# Altium footprint library PBL - THD Packages.PcbLib: 160 footprints (part 10 of 10)
Each footprint in its own frame and in the unit in brackets; x right, y up, seen from the top. Pads: shape width x height; smd on the part's side, far side on the other; paste and mask are expansions set on the pad; w line width, h text height; cw(c..) or ccw(c..) is an arc to the next point about the centre after c.
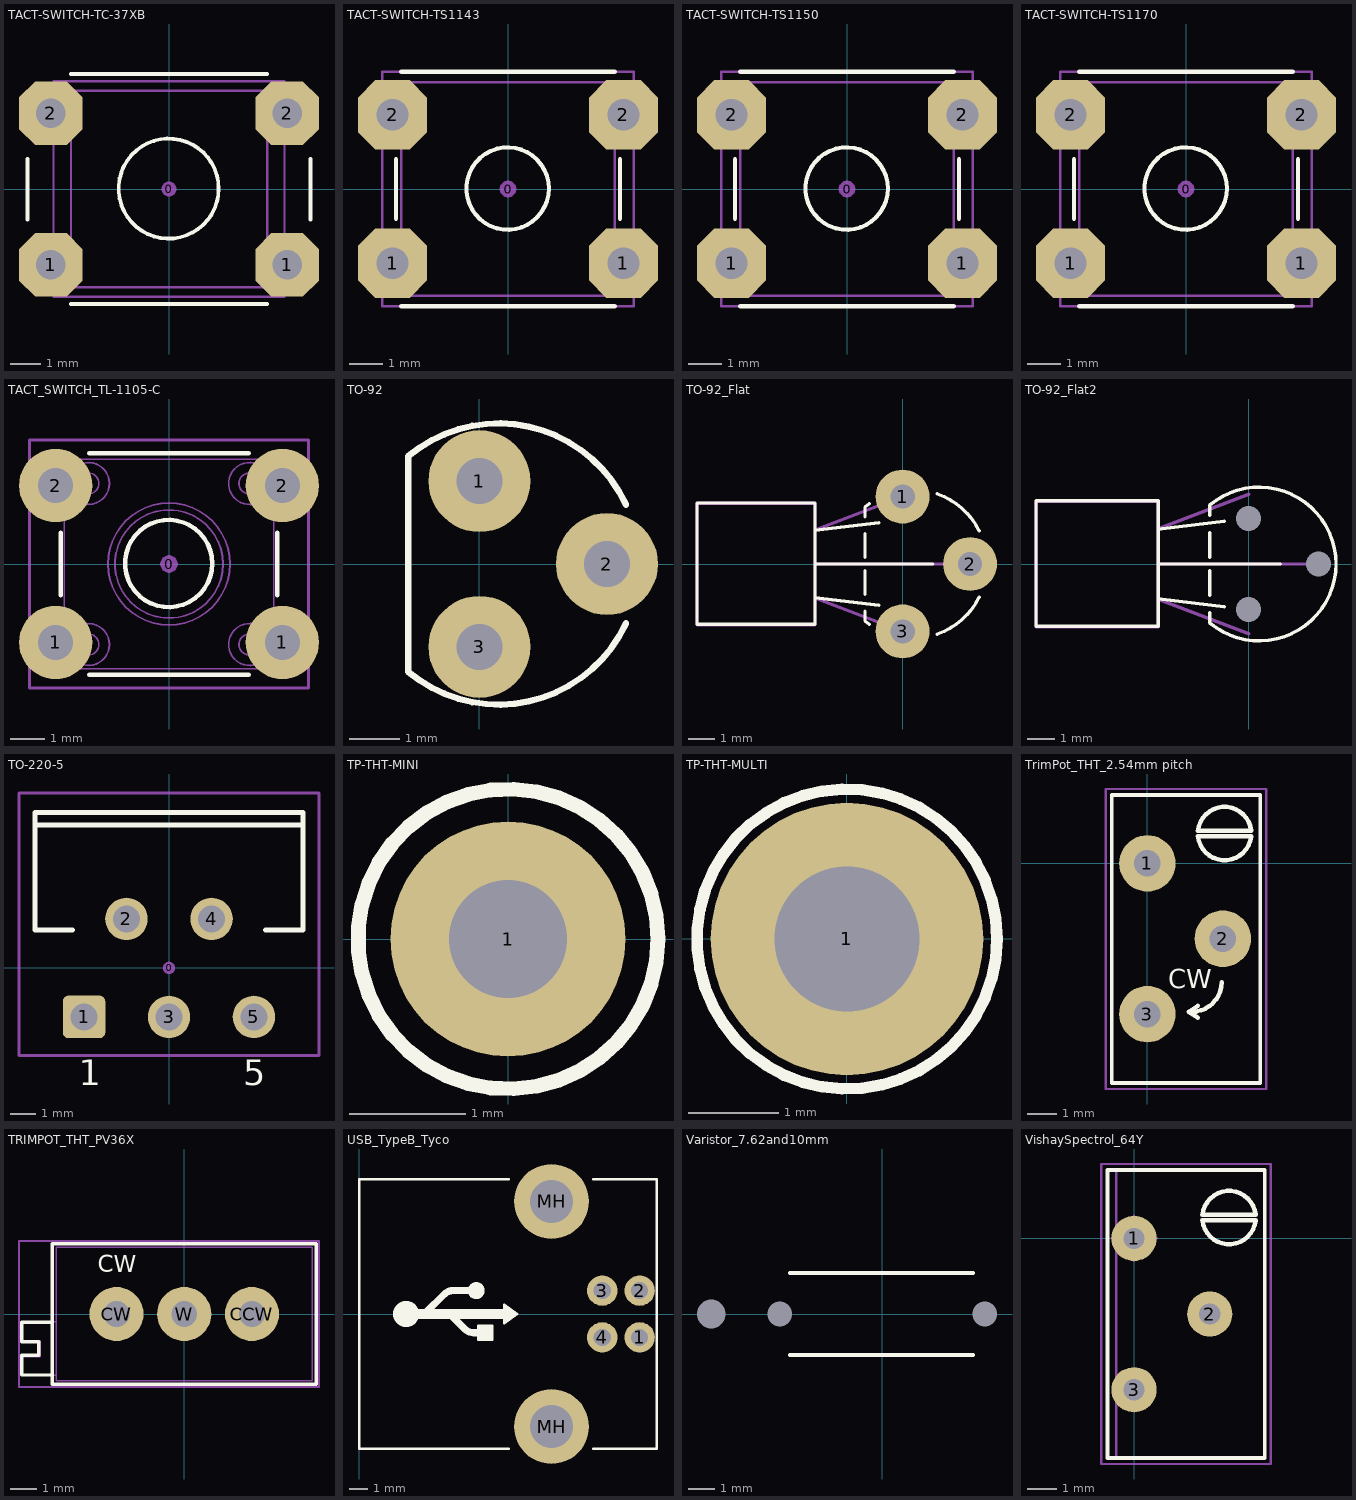
[diagram p9: the footprints below, top view; thin cyan lines are the x and y axes]

## TACT-SWITCH-TC-37XB [mm] "Wealth Metal sealed TH tact switch"
height 5
pads (5):
  round 0.508 on Mech15: 0(0,0)
  oct 2.1x2.1 hole 0.965: 1(-3.9,-2.5) 1(3.9,-2.5) 2(-3.9,2.5) 2(3.9,2.5)
Top Overlay:
  circle w0.127: c-0.011,0.014 r1.65
  lines w0.127: -4.67,-1 -4.67,1 ; -3.239,-3.791 3.24,-3.791 ; -3.232,3.794 3.24,3.794 ; 4.67,-1 4.67,1
13 - 3D Top Side:
  circle w0.076: c-0.011,0.014 r1.65
  lines w0.076: -3.232,-3.237 3.24,-3.237 3.24,3.24 -3.232,3.24 -3.232,-3.237
15 - Top Courtyards:
  lines w0.076: -3.81,-3.556 -3.81,3.556 3.81,3.556 3.81,-3.556 -3.81,-3.556
3D body: height 5, standoff -3.9, extent -4.456,-3.6 4.456,3.6

## TACT-SWITCH-TS1143 [mm] "Bondtact sealed TH tact switch"
height 4.318
pads (5):
  round 0.508 on Mech15: 0(0,0)
  oct 2.1x2.1 hole 0.965: 1(-3.5,-2.25) 1(3.5,-2.25) 2(-3.5,2.25) 2(3.5,2.25)
Top Overlay:
  circle w0.127: c-0.011,0.014 r1.25
  lines w0.127: -3.4,-0.9 -3.4,0.9 ; -3.239,-3.556 3.24,-3.556 ; -3.236,3.556 3.236,3.556 ; 3.4,-0.9 3.4,0.9
13 - 3D Top Side:
  circle w0.076: c-0.011,0.014 r1.25
  lines w0.076: -3.232,-3.237 -3.232,3.24 3.24,3.24 3.24,-3.237 -3.232,-3.237
15 - Top Courtyards:
  lines w0.076: -3.81,-3.556 3.81,-3.556 3.81,3.556 -3.81,3.556 -3.81,-3.556
3D body: height 4.3, standoff -3.5, extent -4.134,-3.25 4.134,3.25

## TACT-SWITCH-TS1150 [mm] "Bondtact sealed TH tact switch"
height 5.18
pads (5):
  round 0.508 on Mech15: 0(0,0)
  oct 2.1x2.1 hole 0.965: 1(-3.5,-2.25) 1(3.5,-2.25) 2(-3.5,2.25) 2(3.5,2.25)
Top Overlay:
  circle w0.127: c-0.011,0.014 r1.25
  lines w0.127: -3.4,-0.9 -3.4,0.9 ; -3.239,-3.556 3.24,-3.556 ; -3.236,3.556 3.236,3.556 ; 3.4,-0.9 3.4,0.9
13 - 3D Top Side:
  circle w0.076: c-0.011,0.014 r1.25
  lines w0.076: -3.232,-3.237 -3.232,3.24 3.24,3.24 3.24,-3.237 -3.232,-3.237
15 - Top Courtyards:
  lines w0.076: -3.81,-3.556 3.81,-3.556 3.81,3.556 -3.81,3.556 -3.81,-3.556
3D body: height 5, standoff -3.5, extent -4.134,-3.25 4.134,3.25

## TACT-SWITCH-TS1170 [mm] "Bondtact sealed TH tact switch"
height 6.985
pads (5):
  round 0.508 on Mech15: 0(0,0)
  oct 2.1x2.1 hole 0.965: 1(-3.5,-2.25) 1(3.5,-2.25) 2(-3.5,2.25) 2(3.5,2.25)
Top Overlay:
  circle w0.127: c-0.011,0.014 r1.25
  lines w0.127: -3.4,-0.9 -3.4,0.9 ; -3.239,-3.556 3.24,-3.556 ; -3.236,3.556 3.236,3.556 ; 3.4,-0.9 3.4,0.9
13 - 3D Top Side:
  circle w0.076: c-0.011,0.014 r1.25
  lines w0.076: -3.232,-3.237 3.24,-3.237 3.24,3.24 -3.232,3.24 -3.232,-3.237
15 - Top Courtyards:
  lines w0.076: -3.81,-3.556 -3.81,3.556 3.81,3.556 3.81,-3.556 -3.81,-3.556
3D body: height 7, standoff -3.5, extent -4.134,-3.25 4.134,3.25

## TACT_SWITCH_TL-1105-C [mm] "E-Switch TL1105 series tact switch 8.0mm stem height"
height 8
pads (5):
  round 0.508 on Mech15: 0(0,0)
  round 2.1 hole 1: 1(-3.25,-2.25) 1(3.25,-2.25) 2(-3.25,2.25) 2(3.25,2.25)
Top Overlay:
  circle w0.127: c-0.011,0.014 r1.25
  lines w0.127: -3.1,-0.9 -3.1,0.9 ; -2.286,-3.175 2.286,-3.175 ; -2.286,3.175 2.286,3.175 ; 3.1,-0.9 3.1,0.9
13 - 3D Top Side:
  circle w0.05: c0,0 r1.55
  circle w0.05: c0,0 r1.75
  circle w0.05: c-2.31,2.309 r0.3
  circle w0.05: c2.307,2.309 r0.3
  circle w0.05: c-2.31,-2.308 r0.3
  circle w0.05: c2.307,-2.308 r0.3
  circle w0.05: c2.309,2.309 r0.6
  circle w0.05: c-2.309,2.309 r0.6
  circle w0.05: c2.309,-2.309 r0.6
  circle w0.05: c-2.309,-2.309 r0.6
  lines w0.05: -3.886,-2.65 -3.886,-1.85 ; -3.886,1.85 -3.886,2.65 ; -3.3,-2.65 -3.3,-1.85 ; -3.3,1.85 -3.3,2.65 ; -3.15,-2.65 -3.15,-1.85 ; -3.15,1.85 -3.15,2.65 ; -3,-2.65 -3.95,-2.65 -3.95,-1.85 -3,-1.85 ; -3,1.85 -3.95,1.85 -3.95,2.65 -3,2.65 ; -2.561,-2.853 ccw(c-2.309,-2.309) -2.538,-2.863 ; -2.561,1.764 ccw(c-2.309,2.309) -2.538,1.754 ; 2.056,-2.853 ccw(c2.309,-2.309) 2.079,-2.863 ; 2.056,1.764 ccw(c2.309,2.309) 2.079,1.754 ; 3,-2.65 3.95,-2.65 3.95,-1.85 3,-1.85 ; 3,1.85 3.95,1.85 3.95,2.65 3,2.65 ; 3.15,-2.65 3.15,-1.85 ; 3.15,1.85 3.15,2.65 ; 3.3,-2.65 3.3,-1.85 ; 3.3,1.85 3.3,2.65 ; 3.886,-2.65 3.886,-1.85 ; 3.886,1.85 3.886,2.65 ; -3,-3 -3,3 3,3 3,-3 -3,-3
15 - Top Courtyards:
  lines w0.076: -4,-3.556 -4,3.556 4,3.556 4,-3.556 -4,-3.556
3D body: height 8, standoff -3.5, extent -3.95,-3 3.95,3

## TO-92 [mil]
height 397.64
pads (3):
  round 80 hole 36: 1(0,65) 2(100,0) 3(0,-65)
Top Overlay:
  lines w5: 114.91,-46.59 cw(c15,0) -55.86,-84.45 -55.86,84.45 cw(c15,0) 114.91,46.59
3D body: height 404.72, standoff -100, extent -54.52,-94.57 107.49,94.56

## TO-92_Flat [mil]
height 151.57
pads (3):
  round 80 hole 36: 1(0,100) 2(100,0) 3(0,-100)
Top Overlay:
  lines w5: -130.03,0 45,0 ; -130,-50 -35.14,-61.16 ; -130,50 -35.14,61.16 ; -55.86,-70 -55.86,-84.45 ccw(c15,0) -49.54,-89.37 ; -55.86,-45 -55.86,-10 ; -55.86,10 -55.86,45 ; -55.86,70 -55.86,84.45 cw(c15,0) -49.54,89.37 ; 51.42,-104.05 ccw(c15,0) 113.6,-49.3 ; 51.42,104.05 cw(c15,0) 113.6,49.3 ; -305.03,-89.45 -130.03,-89.45 -130.03,90.55 -305.03,90.55 -305.03,-89.45
13 - 3D Top Side:
  lines w5: -130,-50.44 0,-100 ; -130,0.1 100,0 ; -130,50.44 0,100 ; -305,-90 -130,-90 -130,90 -305,90 -305,-90
3D body: height 141.73, standoff -100, extent -307.08,-109.84 109.85,109.85

## TO-92_Flat2 [mil]
height 151.57
pads (3):
  round 0 / inner round 0 / far side round 80 hole 36 unplated: 1(0,65) 2(100,0) 3(0,-65)
Top Overlay:
  lines w5: -130.03,0 45,0 ; -130,-50 -35.14,-61.16 ; -130,50 -35.14,61.16 ; -55.86,-70 -55.86,-84.45 ccw(c15,0) -55.86,84.45 -55.86,70 ; -55.86,-45 -55.86,-10 ; -55.86,10 -55.86,45 ; -305.03,-89.45 -305.03,90.55 -130.03,90.55 -130.03,-89.45 -305.03,-89.45
13 - 3D Top Side:
  lines w5: -130,-50.44 0,-100 ; -130,0.1 100,0 ; -130,50.44 0,100 ; -305,-90 -305,90 -130,90 -130,-90 -305,-90
3D body: height 141.73, standoff -100, extent -307.08,-94.48 109.85,94.5

## TO-220-5 [mm] "TO, Thru-Hole, Vertical, Heatsink Mounted; 5 Bent Staggered Leads; Pitch 1.7mm"
height 21.1
pads (6):
  round 0.5 on Mech15: 0(0,0)
  rrect25% 1.7x1.7 hole 1.092: 1(-3.4,-1.96)
  round 1.7 hole 1.092: 2(-1.7,1.96) 3(0,-1.96) 4(1.7,1.96) 5(3.4,-1.96)
Top Overlay:
  lines w0.2: -5.35,5.71 5.35,5.71 ; -3.854,1.51 -5.35,1.51 -5.35,6.21 5.35,6.21 5.35,1.51 3.854,1.51
  text "1" at -3.62,-4.685 h1.02
  text "5" at 2.98,-4.685 h1.02
15 - Top Courtyards:
  lines w0.127: -6,-3.5 -6,7 6,7 6,-3.5 -6,-3.5
3D body: height 20.99, standoff -3, extent -5.08,-2.16 5.08,6.08

## TP-THT-MINI [mil] "Thru-hole test point loop"
height 181.1
pads (1):
  round 80 / inner round 80 / far side round 90 hole 40: 1(0,0)
Top Overlay:
  circle w5: c0,0 r51
13 - 3D Top Side:
  circle w3: c0,0 r29.94
3D body: height 180.51, standoff -118.14, extent -48.82,-49.11 49.21,49.12

## TP-THT-MULTI [mm] "Thru-hole test point loop"
height 8.1
pads (1):
  round 3 hole 1.6: 1(0,0)
Top Overlay:
  circle w0.127: c0,0 r1.651
13 - 3D Top Side:
  circle w0.076: c0,0 r0.76
3D body: height 8.09, standoff -3.21, extent -1.597,-1.6 1.597,1.587

## TrimPot_THT_2.54mm pitch [mil] "TRIMMER, MURATA, PV36Y"
height 421.26
pads (3):
  round 75 hole 35: 1(0,0) 2(100,-100) 3(0,-200)
Top Overlay:
  lines w5: -47.24,-291.34 149.61,-291.34 149.61,90.55 -47.24,90.55 -47.24,-291.34
  lines w6: 58.86,-197.05 ccw(c58.86,-157.48) 98.43,-157.48 ; 66.93,-204.72 55.12,-197.05 66.93,-188.98 ; 67.07,35.81 137.65,35.81 ; 67.06,43.31 137.66,43.31 ; 67.12,43.3 cw(c102.36,39.55) 137.6,43.3 ; 67.13,35.81 ccw(c102.36,39.55) 137.59,35.81
  text "CW" at 27.56,-165.35 h25
13 - 3D Top Side:
  lines w3: -47.24,-291.34 149.61,-291.34 149.61,90.55 -47.24,90.55 -47.24,-291.34
15 - Top Courtyards:
  lines w3: -30,0 30,0 ; 0,-30 0,30 ; -55.12,-299.34 -55.12,98.66 157.48,98.66 157.48,-299.34 -55.12,-299.34
3D body: height 444.88, standoff -236.22, extent -47.24,-287.4 149.61,90.55

## TRIMPOT_THT_PV36X [mil] "TRIMMER, MURATA, PV36X"
height 393.7
pads (3):
  round 80 hole 38: CCW(100,0) CW(-100,0) W(0,0)
Top Overlay:
  lines w5: -195,-90 -240,-90 -240,-61 -215,-61 -215,-41 -240,-41 -240,-12 -195,-12 ; -195,-104 -195,104 195,104 195,-104 -195,-104
  text "CW" at -127.56,61.69 h25
13 - 3D Top Side:
  lines w1.97: -188.98,-90.55 -240.16,-90.55 -240.16,-62.99 -212.6,-62.99 -212.6,-39.37 -240.16,-39.37 -240.16,-11.81 -188.98,-11.81 ; -188.98,-98.43 188.98,-98.43 188.98,98.43 -188.98,98.43 -188.98,-98.43
15 - Top Courtyards:
  lines w3: -244,-108 199,-108 199,108 -244,108 -244,-108
3D body: height 393.7, standoff -110.24, extent -240.16,-98.42 188.98,98.43

## USB_TypeB_Tyco [mm]
height 11.1
pads (6):
  round 1.626 hole 0.914: 1(14.99,-1.25) 2(14.99,1.25) 3(12.99,1.25) 4(12.99,-1.25)
  round 4 hole 2.3: MH(10.28,-6.02) MH(10.28,6.02)
Top Overlay:
  circle w0.508: c6.25,1.25 r0.2
  circle w0.889: c2.5,0 r0.254
  region: 7.1,-1.375 6.35,-1.375 6.35,-0.625 7.1,-0.625
  region: 8.45,0 7.75,-0.5 7.75,0.5
  lines w0.127: 8,-7.2 0,-7.2 0,7.2 8,7.2 ; 12.5,-7.2 15.9,-7.2 15.9,7.2 12.5,7.2 ; 6.35,-1.375 7.1,-1.375 7.1,-0.625 6.35,-0.625 6.35,-1.375 ; 7.75,-0.5 7.75,0.5 8.45,0 7.75,-0.5
  lines w0.381: 3.547,0.062 4.547,1.062 cw(c5,0.61) 5,1.25 6.25,1.25 ; 4.897,-0.062 5.647,-0.812 ccw(c6.1,-0.36) 6.1,-1 6.35,-1
  lines w0.508: 3,0 7.75,0
3D body: height 11.5, standoff -3.93, extent 0,-7.194 15.7,7.194

## Varistor_7.62and10mm [mil] "Capacitor, Ceramic, Thru-Hole, Dipped Radial; Body 6.8 x 3 mm (WxT) Pin Spacing 7.62 mm (typ)"
height 236.22
pads (3):
  round 0 / inner round 0 / far side round 100 hole 42 unplated: 1(-250,0)
  round 0 / inner round 0 / far side oval 100x85 hole 36 unplated: 1(-150,0) 2(150,0)
Top Overlay:
  lines w6: -135,-60 132.72,-60 ; -135,60 132.72,60
3D body: height 472.44, standoff -98.43, extent -216.47,-69.98 216.44,68.36

## VishaySpectrol_64Y [mil] "VISHAY SPECTROL - 64Y - TRIMMER"
height 437.01
pads (3):
  round 60 hole 28: 1(0,0) 2(100.39,-100.39) 3(0,-200.79)
Top Overlay:
  lines w5: -35.43,-291.34 173.23,-291.34 173.23,90.55 -35.43,90.55 -35.43,-291.34
  lines w6: 90.69,23.81 161.27,23.81 ; 90.68,31.31 161.28,31.31 ; 90.75,23.82 ccw(c125.98,27.55) 161.21,23.82 ; 90.74,31.3 cw(c125.98,27.55) 161.22,31.3
13 - 3D Top Side:
  lines w3: -23.62,-291.34 173.23,-291.34 173.23,90.55 -23.62,90.55 -23.62,-291.34
15 - Top Courtyards:
  lines w3: -30,0 30,0 ; 0,-30 0,30 ; -43.62,-299.34 -43.62,98.66 181.38,98.66 181.38,-299.34 -43.62,-299.34
3D body: height 437.01, standoff 385.83, extent 82.68,-15.75 168.95,70.7
3D body: height 385.83, standoff 0, extent -23.62,-291.34 173.23,90.55